# Altium footprint library KEYSTONE_54.PcbLib: 1 footprints
Each footprint in its own frame and in the unit in brackets; x right, y up, seen from the top. Pads: shape width x height; smd on the part's side, far side on the other; paste and mask are expansions set on the pad; w line width, h text height; cw(c..) or ccw(c..) is an arc to the next point about the centre after c.
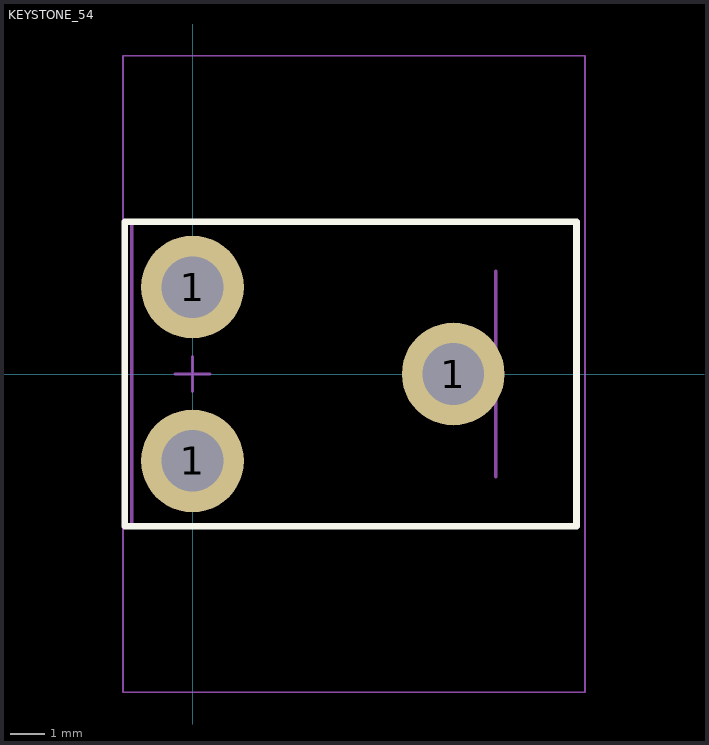
[diagram p0: the footprint, top view; thin cyan lines are the x and y axes]

## KEYSTONE_54 [mm] "Keystone 54, battery contact clip for 17-19 mm cells (18650), through hole"
height 19.5
pads (3):
  round 3 hole 1.8 mask+0.05: 1(0,-2.54) 1(0,2.54) 1(7.62,0)
Top Overlay:
  lines w0.2: -1.98,-4.45 11.22,-4.45 11.22,4.45 -1.98,4.45 -1.98,-4.45
Mechanical 13:
  lines w0.1: 8.86,-3 8.86,3 ; -1.78,-4.45 11.22,-4.45 11.22,4.45 -1.78,4.45 -1.78,-4.45
Mechanical 15:
  lines w0.05: -2.03,-9.3 11.47,-9.3 11.47,9.3 -2.03,9.3 -2.03,-9.3
  lines w0.1: -0.5,0 0.5,0 ; 0,-0.5 0,0.5